# Altium footprint library Footprint_Vlad.PcbLib: 392 footprints (part 23 of 25)
Each footprint in its own frame and in the unit in brackets; x right, y up, seen from the top. Pads: shape width x height; smd on the part's side, far side on the other; paste and mask are expansions set on the pad; w line width, h text height; cw(c..) or ccw(c..) is an arc to the next point about the centre after c.
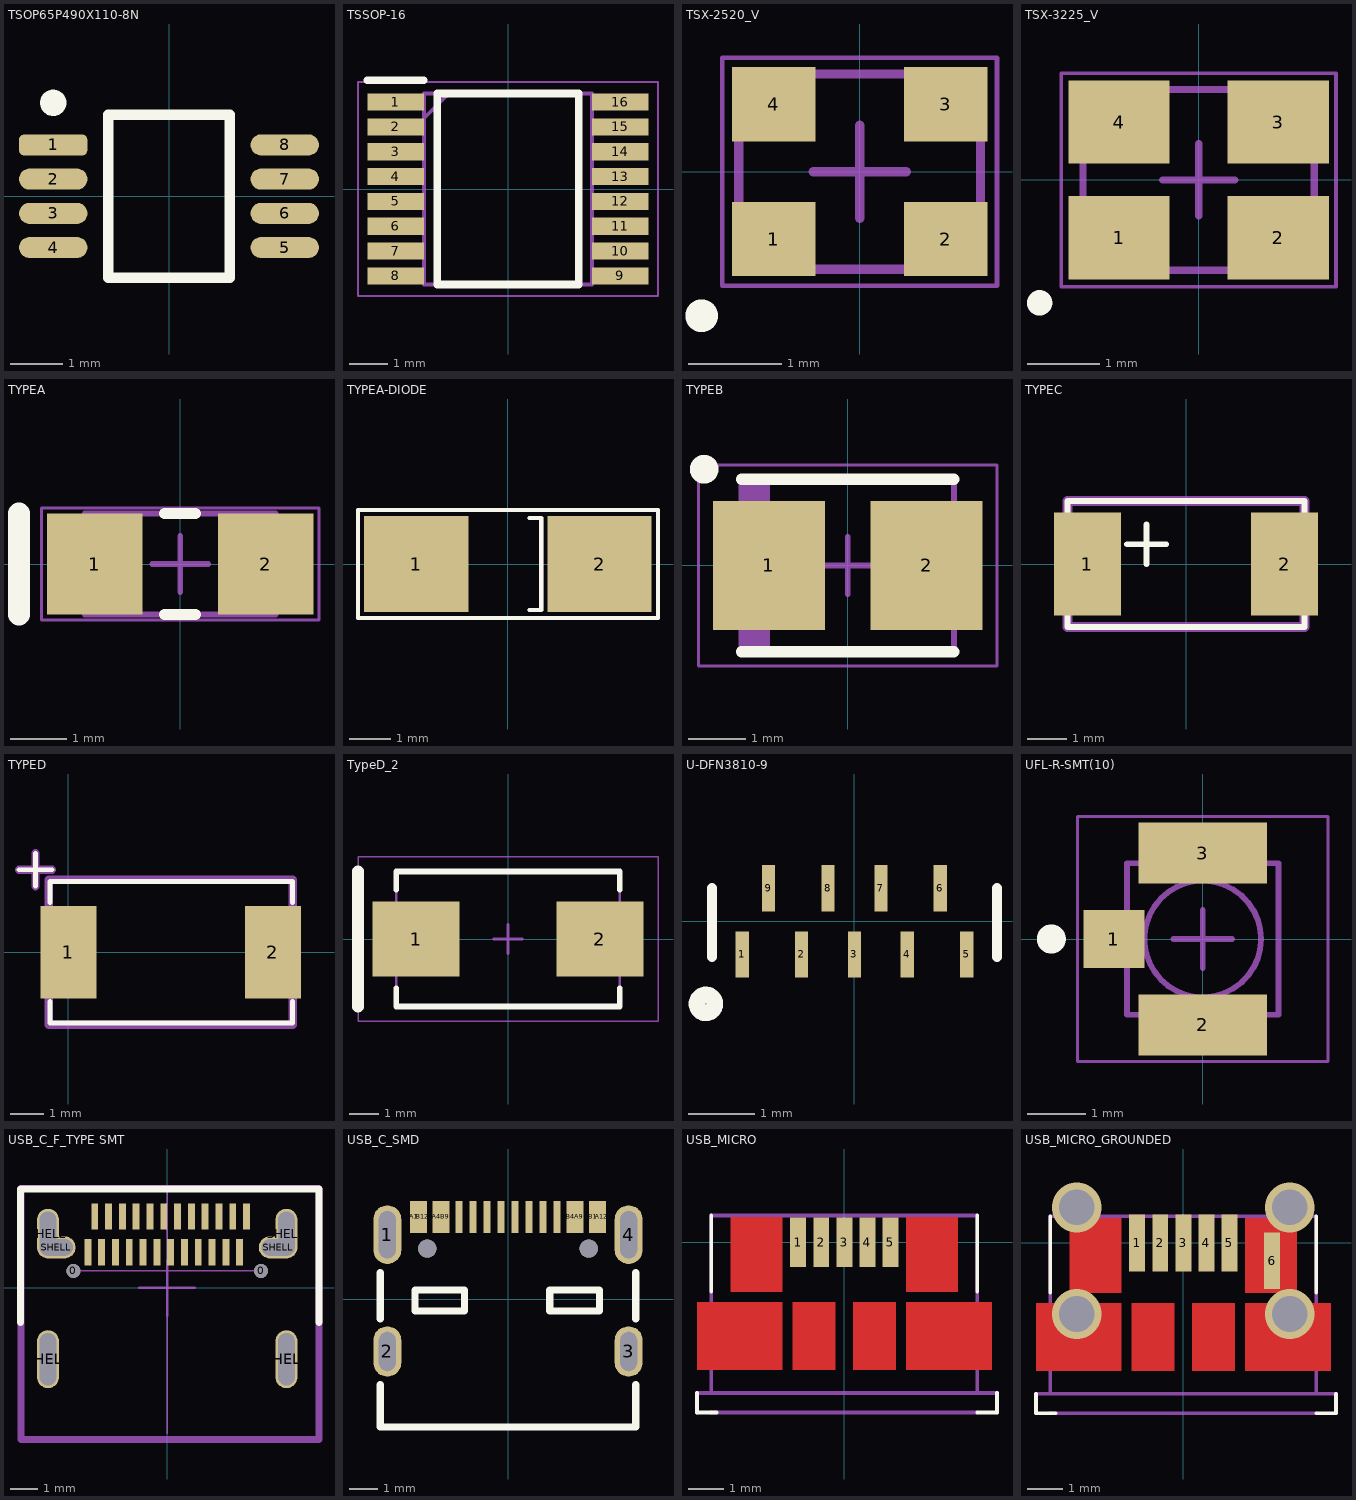
[diagram p22: the footprints below, top view; thin cyan lines are the x and y axes]

## TSOP65P490X110-8N [mm] "TSOP, 8-Leads, Body 3,00x3,00mm, Pitch 0,65mm, IPC Medium Density"
height 1.1
pads (8):
  rrect50% 1.3x0.4 smd: 1(-2.2,0.975)
  oval 1.3x0.4 smd: 2(-2.2,0.325) 3(-2.2,-0.325) 4(-2.2,-0.975) 5(2.2,-0.975) 6(2.2,-0.325) 7(2.2,0.325) 8(2.2,0.975)
Top Overlay:
  circle w0.25: c-2.2,1.775 r0.125
  lines w0.2: -1.15,-1.55 -1.15,1.55 1.15,1.55 1.15,-1.55 -1.15,-1.55
3D body "TSOP65P490X110-8N.step": height 1.1, standoff 0, extent -2.45,-1.55 2.45,1.55

## TSSOP-16 [mm]
pads (16):
  rect 1.475x0.45 smd: 1(-2.938,2.275) 2(-2.938,1.625) 3(-2.938,0.975) 4(-2.938,0.325) 5(-2.938,-0.325) 6(-2.938,-0.975) 7(-2.938,-1.625) 8(-2.938,-2.275) 9(2.938,-2.275) 10(2.938,-1.625) 11(2.938,-0.975) 12(2.938,-0.325) 13(2.938,0.325) 14(2.938,0.975) 15(2.938,1.625) 16(2.938,2.275)
Top Overlay:
  lines w0.2: -3.675,2.85 -2.2,2.85 ; -1.85,-2.5 1.85,-2.5 1.85,2.5 -1.85,2.5 -1.85,-2.5
Mechanical 13:
  lines w0.1: -2.2,1.85 -1.55,2.5 ; -2.2,-2.5 2.2,-2.5 2.2,2.5 -2.2,2.5 -2.2,-2.5
Mechanical 15:
  lines w0.05: -3.925,-2.8 3.925,-2.8 3.925,2.8 -3.925,2.8 -3.925,-2.8
3D body "ADG709BRUZ.stp": height 1.2, standoff 0, extent -3.2,-2.5 3.2,2.5

## TSX-2520_V [mm] "SMD, 4-Leads, Body 2.5x2.0mm"
height 0.9
pads (4):
  rect 0.9x0.8 smd: 1(-0.925,-0.725) 2(0.925,-0.725) 3(0.925,0.725) 4(-0.925,0.725)
Top Overlay:
  circle w0.25: c-1.7,-1.55 r0.05
Mechanical 13:
  lines w0.1: -1.3,-1.05 1.3,-1.05 1.3,1.05 -1.3,1.05 -1.3,-1.05
Mechanical 15:
  lines w0.05: -1.477,-1.227 -1.477,1.227 1.477,1.227 1.477,-1.227 -1.477,-1.227
  lines w0.1: -0.5,0 0.5,0 ; 0,-0.5 0,0.5
3D body: height 0.9, standoff 0, extent -1.29,-1.051 1.3,1.054

## TSX-3225_V [mm] "SMD, 4-Leads, Body 3.2x2.5mm"
height 0.6
pads (4):
  rect 1.4x1.15 smd: 1(-1.1,-0.8) 2(1.1,-0.8) 3(1.1,0.8) 4(-1.1,0.8)
Top Overlay:
  circle w0.25: c-2.2,-1.7 r0.05
Mechanical 13:
  lines w0.1: -1.6,-1.25 -1.6,1.25 1.6,1.25 1.6,-1.25 -1.6,-1.25
Mechanical 15:
  lines w0.05: -1.9,-1.475 1.9,-1.475 1.9,1.475 -1.9,1.475 -1.9,-1.475
  lines w0.1: -0.5,0 0.5,0 ; 0,-0.5 0,0.5
3D body: height 0.6, standoff 0, extent -1.6,-1.25 1.6,1.25

## TYPEA [mm] "Molded Capacitor, 2-Leads, Body 3.40x1.80mm"
height 1.8
pads (2):
  rect 1.7x1.8 smd: 1(-1.525,0) 2(1.525,0)
Top Overlay:
  lines w0.2: -0.275,-0.9 0.275,-0.9 ; -0.275,0.9 0.275,0.9
  lines w0.4: -2.875,-0.9 -2.875,0.9
Mechanical 13:
  rectangle: -1.7,-0.9 -1.243,0.9
  lines w0.1: -1.7,-0.9 -1.7,0.9 1.7,0.9 1.7,-0.9 -1.7,-0.9
Mechanical 15:
  lines w0.05: -2.475,-1 -2.475,1 2.475,1 2.475,-1 -2.475,-1
  lines w0.1: -0.5,0 0.5,0 ; 0,-0.5 0,0.5
3D body "CAPMP3216X18L.step": height 1.8, standoff 0, extent -1.92,-0.9 1.92,0.9

## TYPEA-DIODE [mm]
pads (2):
  rect 2.5x2.3 smd: 1(-2.2,0) 2(2.2,0)
Top Overlay:
  lines w0.1: -3.6,-1.3 -3.6,1.3 3.6,1.3 3.6,-1.3 -3.58,-1.3 ; 0.52,-1.1 0.8,-1.1 0.8,1.1 0.52,1.1
Mechanical 15:
  lines w0.1: -3.6,-1.3 -3.6,1.3 3.6,1.3 3.6,-1.3 -3.58,-1.3 ; 0.52,-1.1 0.8,-1.1 0.8,1.1 0.52,1.1
  text ".Designator" at -3.3,1.5 h1.52

## TYPEB [mm] "Molded Capacitor, 2-Leads, Body 3.7x3mm, IPC Medium Density"
height 2.1
pads (2):
  rect 1.95x2.25 smd: 1(-1.375,0) 2(1.375,0)
Top Overlay:
  circle w0.25: c-2.5,1.675 r0.125
  lines w0.2: -1.85,-1.5 1.85,-1.5 ; -1.85,1.5 1.85,1.5
Mechanical 13:
  region: -1.352,1.5 -1.85,1.5 -1.85,-1.5 -1.352,-1.5
  lines w0.1: -1.85,-1.5 -1.85,1.5 1.85,1.5 1.85,-1.5 -1.85,-1.5
Mechanical 15:
  lines w0.05: -2.6,-1.75 -2.6,1.75 2.6,1.75 2.6,-1.75 -2.6,-1.75
  lines w0.1: -0.5,0 0.5,0 ; 0,-0.5 0,0.5
3D body "T520B337M2R5ATE045.step": height 2.11, standoff 0.01, extent -1.85,-1.5 1.85,1.5

## TYPEC [mm]
pads (2):
  rect 1.7x2.6 smd: 1(-2.5,0) 2(2.5,0)
Top Overlay:
  lines w0.15: -1.5,0.5 -0.5,0.5 ; -1,0 -1,1 ; -3,-1.6 3,-1.6 3,1.6 -3,1.6 -3,-1.6
Mechanical 15:
  lines w0.254: -3,-1.6 -3,1.6 3,1.6 3,-1.6 -3,-1.6
  text ".Designator" at -2.6,2 h1.52

## TYPED [mm]
pads (2):
  rect 1.7x2.8 smd: 1(0,0) 2(6.2,0)
Top Overlay:
  lines w0.15: -1.5,2.5 -0.5,2.5 ; -1,2 -1,3 ; -0.56,-2.15 -0.56,-1.5 ; -0.56,1.5 -0.56,2.15 ; -0.55,-2.15 6.75,-2.15 ; -0.55,2.15 6.75,2.15 ; 6.79,-2.15 6.79,-1.5 ; 6.79,1.5 6.79,2.15
Mechanical 15:
  lines w0.254: -1.5,2.5 -0.5,2.5 ; -1,2 -1,3 ; -0.6,-2.2 -0.6,2.2 6.8,2.2 6.8,-2.2 -0.6,-2.2
  text ".Designator" at 0.1,2.5 h1.52

## TypeD_2 [mm] "Molded Capacitor, 2-Leads, Body 7.60x4.60mm, IPC Low Density"
height 3.1
pads (2):
  rect 2.95x2.55 smd: 1(-3.125,0) 2(3.125,0)
Top Overlay:
  lines w0.2: -3.8,-1.675 -3.8,-2.3 3.8,-2.3 3.8,-1.675 ; -3.8,1.675 -3.8,2.3 3.8,2.3 3.8,1.675
  lines w0.4: -5.1,-2.3 -5.1,2.3
Mechanical 13:
  lines w0.1: -3.8,-2.3 3.8,-2.3 3.8,2.3 -3.8,2.3 -3.8,-2.3
Mechanical 15:
  lines w0.05: -5.1,-2.8 5.1,-2.8 5.1,2.8 -5.1,2.8 -5.1,-2.8
  lines w0.1: -0.5,0 0.5,0 ; 0,-0.5 0,0.5
3D body "T491D476M006AT.step": height 3.1, standoff 0, extent -3.8,-2.3 3.8,2.3

## U-DFN3810-9 [mm]
pads (9):
  rect 0.2x0.7 smd: 1(-1.7,-0.5) 2(-0.8,-0.5) 3(0,-0.5) 4(0.8,-0.5) 5(1.7,-0.5) 6(1.3,0.5) 7(0.4,0.5) 8(-0.4,0.5) 9(-1.3,0.5)
Top Overlay:
  circle w0.254: c-2.25,-1.25 r0.135
  lines w0.15: -2.159,-0.542 -2.159,0.508 ; 2.159,-0.542 2.159,0.508
3D body: height 0.55, standoff 0, extent -1.925,-0.525 1.925,0.525

## UFL-R-SMT(10) [mm] "Connector, 3-Leads, Body 2.6x2.6mm"
height 1.25
pads (3):
  rect 1.05x1 smd: 1(-1.525,0)
  rect 2.2x1.05 smd: 2(0,-1.475) 3(0,1.475)
Top Overlay:
  circle w0.25: c-2.6,0 r0.125
Mechanical 13:
  circle w0.1: c0,0 r1
  lines w0.1: -1.3,-1.3 1.3,-1.3 1.3,1.3 -1.3,1.3 -1.3,-1.3
Mechanical 15:
  lines w0.05: -2.15,-2.1 -2.15,2.1 2.15,2.1 2.15,-2.1 -2.15,-2.1
  lines w0.1: -0.5,0 0.5,0 ; 0,-0.5 0,0.5
3D body: height 1.25, standoff 0, extent -0.999,-1 0.999,0.999
3D body: height 0.35, standoff 0, extent -1.3,-1.3 1.3,1.3

## USB_C_F_TYPE SMT [mm]
pads (32):
  round 0.5 hole 0.5 unplated: 0(-3.4,0.613) 0(3.4,0.613)
  rect 0.25x0.95 smd: A1(-2.625,2.588) A2(-2.125,2.588) A3(-1.625,2.588) A4(-1.125,2.588) A5(-0.625,2.588) A6(-0.125,2.588) A7(0.375,2.588) A8(0.875,2.588) A9(1.375,2.588) A10(1.875,2.588) A11(2.375,2.588) A12(2.875,2.588) B1(2.625,1.288) B2(2.125,1.288) B3(1.625,1.288) B4(1.125,1.288) B5(0.625,1.288) B6(0.125,1.288) B7(-0.375,1.288) B8(-0.875,1.288) B9(-1.375,1.288) B10(-1.875,1.288) B11(-2.375,1.288) B12(-2.875,1.288)
  oval 0.8x2.1 hole 0.6 slot 1.9 at 90 deg: SHELL(-4.32,-2.588) SHELL(4.32,-2.588)
  oval 0.8x1.8 hole 0.6 slot 1.6 at 90 deg: SHELL(-4.32,1.963) SHELL(4.32,1.963)
  oval 1.4x0.8 hole 0.6 slot 1.2 at 0 deg: SHELL(-4.02,1.463) SHELL(4.02,1.463)
Top Overlay:
  lines w0.254: -5.32,-1.25 -5.32,3.587 5.5,3.587 5.5,-1.25
Top Paste:
  region: -4.75,1.5 -4.752,1.413 -4.69,1.25 -4.571,1.124 -4.412,1.052 -4.325,1.05 -3.68,1.05 -3.586,1.058 -3.424,1.153 -3.317,1.307 -3.286,1.492 -3.336,1.672 -3.457,1.815 -3.628,1.893 -3.815,1.891 -3.9,1.85 -3.9,2.5 -3.9,2.58 -3.961,2.727 -4.073,2.839 -4.22,2.9 -4.3,2.9 -4.385,2.905 -4.545,2.85 -4.671,2.737 -4.745,2.585 -4.75,2.5
  region: 4.75,1.5 4.752,1.413 4.69,1.25 4.571,1.124 4.412,1.052 4.325,1.05 3.68,1.05 3.586,1.058 3.424,1.153 3.317,1.307 3.286,1.492 3.336,1.672 3.457,1.815 3.628,1.893 3.815,1.891 3.9,1.85 3.9,2.5 3.9,2.58 3.961,2.727 4.073,2.839 4.22,2.9 4.3,2.9 4.385,2.905 4.545,2.85 4.671,2.737 4.745,2.585 4.75,2.5
  region: 3.9,-3.25 3.9,-3.33 3.961,-3.477 4.073,-3.589 4.22,-3.65 4.3,-3.65 4.35,-3.65 4.43,-3.65 4.577,-3.589 4.689,-3.477 4.75,-3.33 4.75,-3.25 4.75,-1.95 4.75,-1.865 4.685,-1.709 4.566,-1.59 4.41,-1.525 4.325,-1.525 4.24,-1.525 4.084,-1.59 3.965,-1.709 3.9,-1.865 3.9,-1.95
  region: -4.74,-3.25 -4.74,-3.33 -4.679,-3.477 -4.567,-3.589 -4.42,-3.65 -4.34,-3.65 -4.29,-3.65 -4.21,-3.65 -4.063,-3.589 -3.951,-3.477 -3.89,-3.33 -3.89,-3.25 -3.89,-1.95 -3.89,-1.865 -3.955,-1.709 -4.074,-1.59 -4.23,-1.525 -4.315,-1.525 -4.4,-1.525 -4.556,-1.59 -4.675,-1.709 -4.74,-1.865 -4.74,-1.95
Mechanical 3:
  lines w0.05: -3.4,0.613 3.4,0.613 ; 0,-5.288 0,3.587
Mechanical 15:
  lines w0.1: -1,0 1,0 ; 0,-1 0,1
  lines w0.254: -5.3,-5.5 5.5,-5.5 5.5,3.6 -5.3,3.6 -5.3,-5.5
  text ".Designator" at -3.2,4 h1.52

## USB_C_SMD [mm]
pads (22):
  oval 1x2.1 hole 0.6 slot 1.7 at 90 deg: 1(-4.332,2.315) 4(4.308,2.315)
  oval 1x1.8 hole 0.6 slot 1.4 at 90 deg: 2(-4.332,-1.865) 3(4.308,-1.865)
  rect 0.3x1.15 smd: A1(-3.362,2.95) A4(-2.562,2.95) A9(2.538,2.95) A12(3.338,2.95) B1(3.038,2.95) B4(2.238,2.95) B9(-2.262,2.95) B12(-3.062,2.95)
  rect 0.25x1.15 smd: A5(-1.261,2.95) A6(-0.261,2.95) A7(0.238,2.95) A8(1.238,2.95) B5(1.739,2.95) B6(0.739,2.95) B7(-0.762,2.95) B8(-1.762,2.95)
  round 0.65 hole 0.65 unplated: ""(-2.902,1.815) ""(2.878,1.815)
Top Overlay:
  lines w0.254: -4.584,-3.048 -4.584,-4.572 4.56,-4.572 4.56,-3.048 ; -4.584,-0.699 -4.584,0.952 ; 4.56,-0.699 4.56,0.952 ; -3.341,-0.422 -3.341,0.34 -1.563,0.34 -1.563,-0.422 -3.341,-0.422 ; 1.485,-0.422 1.485,0.34 3.263,0.34 3.263,-0.422 1.485,-0.422

## USB_MICRO [mm]
pads (5):
  rect 0.45x1.4 smd: 1(-1.3,0) 2(-0.65,0) 3(0,0) 4(0.65,0) 5(1.3,0)
Top Layer:
  region: -1.75,0.7 -3.2,0.7 -3.2,-1.4 -1.75,-1.4
  region: 1.75,-1.4 3.2,-1.4 3.2,0.7 1.75,0.7
  region: -0.25,-1.7 -1.45,-1.7 -1.45,-3.6 -0.25,-3.6
  region: -1.75,-1.7 -4.15,-1.7 -4.15,-3.6 -1.75,-3.6
  region: 0.25,-3.6 1.45,-3.6 1.45,-1.7 0.25,-1.7
  region: 1.75,-3.6 4.15,-3.6 4.15,-1.7 1.75,-1.7
Top Overlay:
  lines w0.1: -4.15,-4.25 -4.15,-4.8 -3.6,-4.8 ; -3.75,-1.4 -3.75,0.75 ; 3.75,-4.8 4.3,-4.8 4.3,-4.25 ; 3.75,-1.4 3.75,0.75
Top Paste:
  region: -1.85,0.6 -3.1,0.6 -3.1,-1.3 -1.85,-1.3
  region: 1.85,-1.3 3.1,-1.3 3.1,0.6 1.85,0.6
  region: -0.35,-1.8 -1.35,-1.8 -1.35,-3.5 -0.35,-3.5
  region: -4.05,-1.8 -4.05,-3.5 -1.85,-3.5 -1.85,-1.8
  region: 0.35,-3.5 1.35,-3.5 1.35,-1.8 0.35,-1.8
  region: 1.85,-1.8 1.85,-3.5 4.05,-3.5 4.05,-1.8
Top Solder:
  region: -1.85,0.6 -3.1,0.6 -3.1,-1.3 -1.85,-1.3
  region: 1.85,-1.3 3.1,-1.3 3.1,0.6 1.85,0.6
  region: -0.35,-1.8 -1.35,-1.8 -1.35,-3.5 -0.35,-3.5
  region: -4.05,-1.8 -4.05,-3.5 -1.85,-3.5 -1.85,-1.8
  region: 0.35,-3.5 1.35,-3.5 1.35,-1.8 0.35,-1.8
  region: 1.85,-1.8 1.85,-3.5 4.05,-3.5 4.05,-1.8
Mechanical 1:
  lines w0.1: -3.75,-4.8 3.75,-4.8 ; -3.75,-4.25 -3.75,0.75 3.75,0.75 3.75,-4.25 ; 4.3,-4.8 4.3,-4.25 -4.15,-4.25 ; -4.15,-4.25 -4.15,-4.8 -4.15,-4.25

## USB_MICRO_GROUNDED [mm]
pads (6):
  rect 0.45x1.6 smd: 1(-1.3,0) 2(-0.65,0) 3(0,0) 4(0.65,0) 5(1.3,0) 6(2.5,-0.5)
via -3,-2 diameter 1.4 hole 1
via -3,1 diameter 1.4 hole 1
via 3,-2 diameter 1.4 hole 1
via 3,1 diameter 1.4 hole 1
Top Layer:
  region: -0.25,-1.7 -1.45,-1.7 -1.45,-3.6 -0.25,-3.6
  region: -1.75,-1.7 -4.15,-1.7 -4.15,-3.6 -1.75,-3.6
  region: 0.25,-3.6 1.45,-3.6 1.45,-1.7 0.25,-1.7
  region: 1.75,-3.6 4.15,-3.6 4.15,-1.7 1.75,-1.7
  region: -1.75,0.7 -3.2,0.7 -3.2,-1.4 -1.75,-1.4
  region: 1.75,-1.4 3.2,-1.4 3.2,0.7 1.75,0.7
Top Overlay:
  lines w0.1: -4.15,-4.25 -4.15,-4.8 -3.6,-4.8 ; -3.75,-1.4 -3.75,0.75 ; 3.75,-4.8 4.3,-4.8 4.3,-4.25 ; 3.75,-1.4 3.75,0.75
Top Paste:
  region: -0.35,-1.8 -1.35,-1.8 -1.35,-3.5 -0.35,-3.5
  region: -4.05,-1.8 -4.05,-3.5 -1.85,-3.5 -1.85,-1.8
  region: 0.35,-3.5 1.35,-3.5 1.35,-1.8 0.35,-1.8
  region: 1.85,-1.8 1.85,-3.5 4.05,-3.5 4.05,-1.8
  region: -1.85,0.6 -3.1,0.6 -3.1,-1.3 -1.85,-1.3
  region: 1.85,-1.3 3.1,-1.3 3.1,0.6 1.85,0.6
Top Solder:
  region: -0.35,-1.8 -1.35,-1.8 -1.35,-3.5 -0.35,-3.5
  region: -4.05,-1.8 -4.05,-3.5 -1.85,-3.5 -1.85,-1.8
  region: 0.35,-3.5 1.35,-3.5 1.35,-1.8 0.35,-1.8
  region: 1.85,-1.8 1.85,-3.5 4.05,-3.5 4.05,-1.8
  region: -1.85,0.6 -3.1,0.6 -3.1,-1.3 -1.85,-1.3
  region: 1.85,-1.3 3.1,-1.3 3.1,0.6 1.85,0.6
Mechanical 1:
  lines w0.1: -3.75,-4.8 3.75,-4.8 ; -3.75,-4.25 -3.75,0.75 3.75,0.75 3.75,-4.25 ; 4.3,-4.8 4.3,-4.25 -4.15,-4.25 ; -4.15,-4.25 -4.15,-4.8 -4.15,-4.25